# Altium schematic symbol library UCC21550BDWKR.SchLib: 1 symbol
Pins are listed as number, name and electrical type; pins without a type are passive.

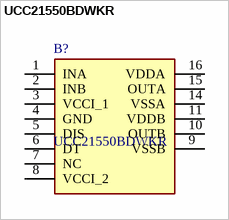
[diagram p0: symbol UCC21550BDWKR]

## UCC21550BDWKR
designator B?
4A, 6A Gate Driver Capacitive Coupling 5000Vrms 2 Channel 14-SOIC; Manufacturer_Name: Texas Instruments; Geometry.Height: 2.65mm; Manufacturer_Part_Number: UCC21550BDWKR; Mouser Part Number: 595-UCC21550BDWKR; Mouser Price/Stock: https://www.mouser.co.uk/ProductDetail/Texas-Instruments/UCC21550BDWKR?qs=IKkN%2F947nfBgJxNddjVcBA%3D%3D; Arrow Part Number: UCC21550BDWKR; Arrow Price/Stock: https://www.arrow.com/en/products/ucc21550bdwkr/texas-instruments?utm_currency=USD&region=nac; Datasheet Link: https://www.ti.com/lit/gpn/UCC21550
footprint UCC21550BDWKR
pins: 1 INA, 2 INB, 3 VCCI_1, 4 GND, 5 DIS, 6 DT, 7 NC, 8 VCCI_2, 9 VSSB, 10 OUTB, 11 VDDB, 14 VSSA, 15 OUTA, 16 VDDA